# Altium footprint library for_Lamp.PcbLib: 22 footprints (part 1 of 2)
Each footprint in its own frame and in the unit in brackets; x right, y up, seen from the top. Pads: shape width x height; smd on the part's side, far side on the other; paste and mask are expansions set on the pad; w line width, h text height; cw(c..) or ccw(c..) is an arc to the next point about the centre after c.
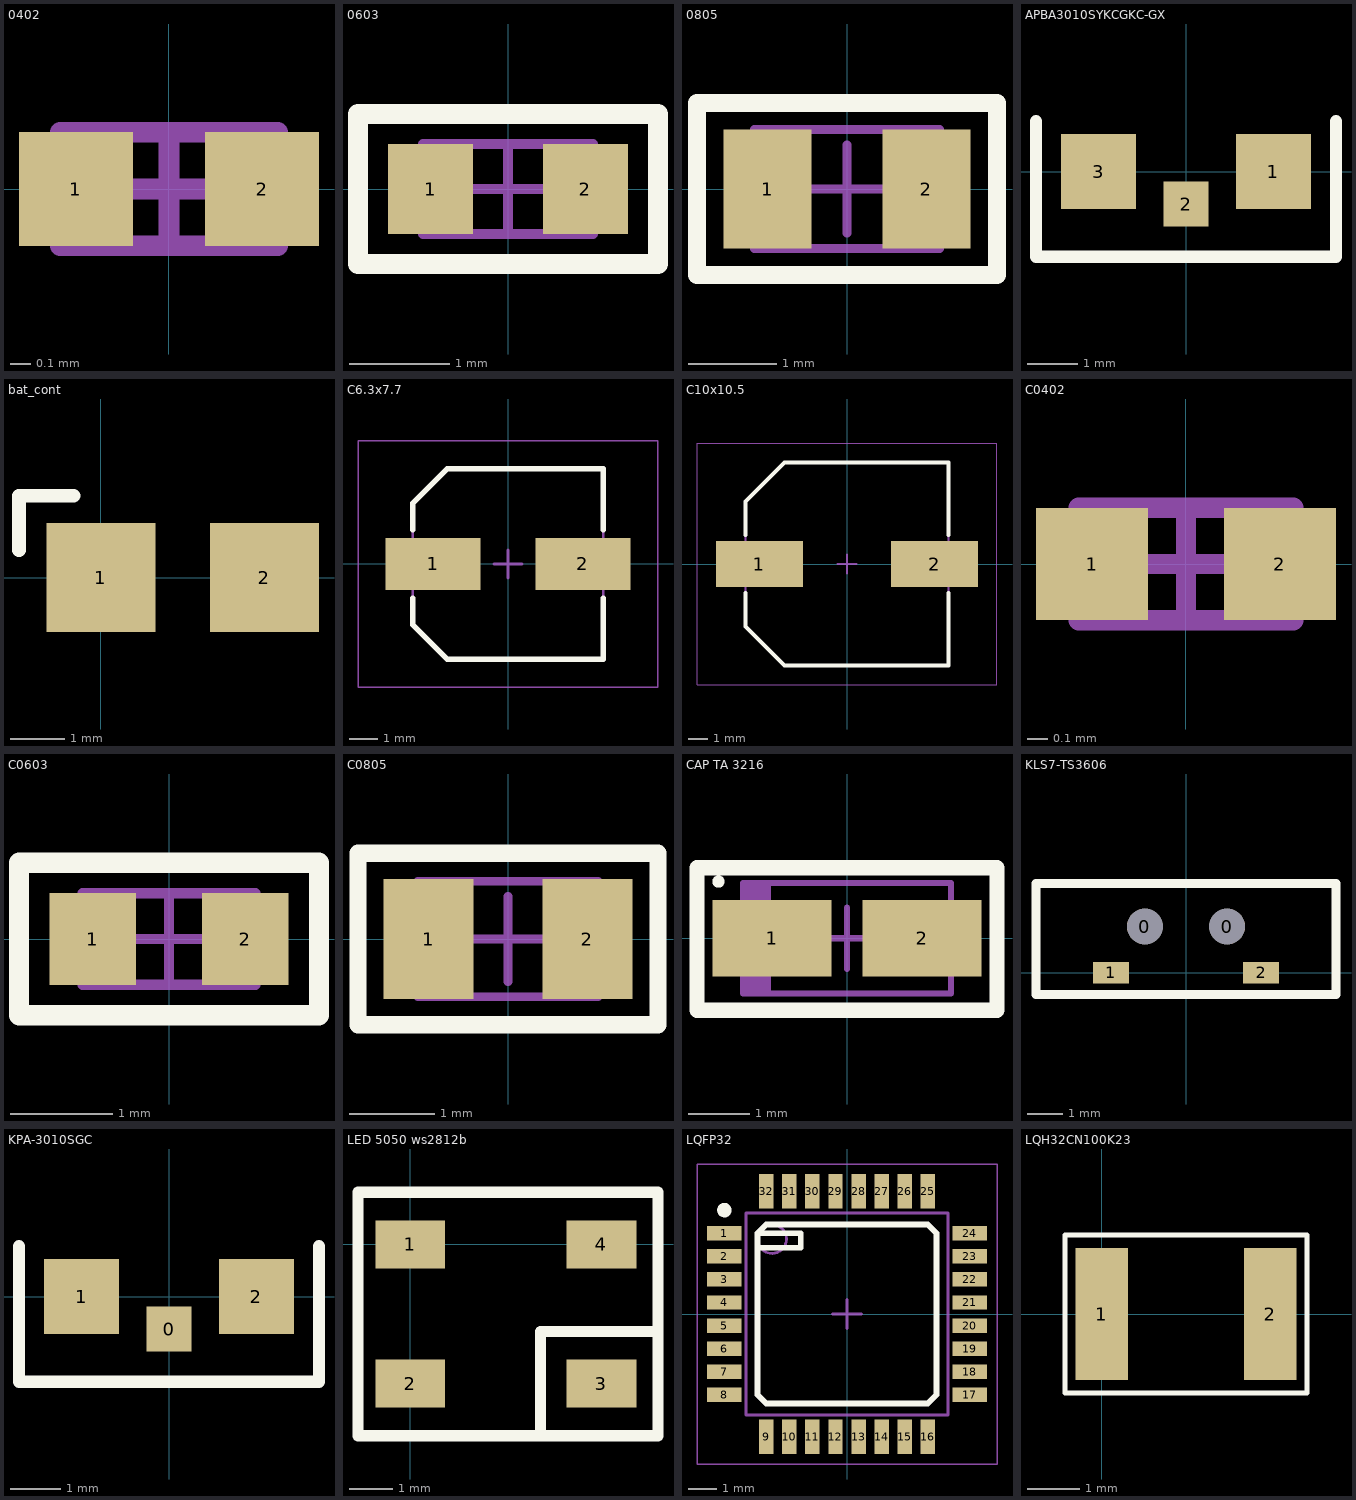
[diagram p0: the footprints below, top view; thin cyan lines are the x and y axes]

## 0402 [mm] "Chip Resistor, 2-Leads, Body 1,00x0,50mm, IPC Medium Density"
height 0.4
pads (2):
  rect 0.55x0.55 smd: 1(-0.45,0) 2(0.45,0)
Mechanical 13:
  lines w0.1: -0.525,-0.275 0.525,-0.275 0.525,0.275 -0.525,0.275 -0.525,-0.275
Mechanical 15:
  lines w0.1: -0.275,0 0.275,0 ; 0,-0.275 0,0.275
3D body "0402.step": height 0.4, standoff 0, extent -0.525,-0.275 0.525,0.275

## 0603 [mm] "Chip Resistor, 2-Leads, Body 1,60x0,80mm, IPC Medium Density"
height 0.55
pads (2):
  rect 0.85x0.9 smd: 1(-0.775,0) 2(0.775,0)
Top Overlay:
  lines w0.2: -1.5,-0.75 -1.5,0.75 1.5,0.75 1.5,-0.75 -1.5,-0.75
Mechanical 13:
  lines w0.1: -0.85,-0.45 0.85,-0.45 0.85,0.45 -0.85,0.45 -0.85,-0.45
Mechanical 15:
  lines w0.1: -0.45,0 0.45,0 ; 0,-0.45 0,0.45
3D body "R0603.step": height 0.55, standoff 0, extent -0.85,-0.45 0.85,0.45

## 0805 [mm] "Chip Resistor, 2-Leads, Body 2,00x1,25mm, IPC Medium Density"
height 0.6
pads (2):
  rect 1x1.35 smd: 1(-0.9,0) 2(0.9,0)
Top Overlay:
  lines w0.2: -1.7,-0.975 1.7,-0.975 1.7,0.975 -1.7,0.975 -1.7,-0.975
Mechanical 13:
  lines w0.1: -1.05,-0.675 1.05,-0.675 1.05,0.675 -1.05,0.675 -1.05,-0.675
Mechanical 15:
  lines w0.1: -0.5,0 0.5,0 ; 0,-0.5 0,0.5
3D body "R0805.step": height 0.6, standoff 0, extent -1.05,-0.675 1.05,0.675

## APBA3010SYKCGKC-GX [mm]
pads (3):
  rect 1.5x1.5 smd: 1(1.75,0) 3(-1.75,0)
  rect 0.9x0.9 smd: 2(0,-0.65)
Top Overlay:
  lines w0.25: -3,1 -3,-1.7 3,-1.7 3,1
3D body "APBA3010.stp": height 0.99, standoff -0.01, extent -1.491,-0.4 1.509,1.6

## bat_cont [mm]
pads (2):
  rect 2x2 smd: 1(0,0) 2(3,0)
Top Overlay:
  lines w0.25: -1.5,0.5 -1.5,1.5 -0.5,1.5

## C6.3x7.7 [mm] "Aluminum Electrolytic Capacitor, Body 6,60x6,60x7,70mm, IPC Low Density"
height 7.7
pads (2):
  rect 3.4x1.85 smd: 1(-2.675,0) 2(2.675,0)
Top Overlay:
  lines w0.2: -3.4,-1.225 -3.4,-2.163 -2.163,-3.4 3.4,-3.4 3.4,-1.225 ; -3.4,1.225 -3.4,2.163 -2.163,3.4 3.4,3.4 3.4,1.225
Mechanical 13:
  lines w0.1: -3.4,-2.163 -3.4,2.163 -2.163,3.4 3.4,3.4 3.4,-3.4 -2.163,-3.4 -3.4,-2.163
Mechanical 15:
  lines w0.05: -5.35,-4.4 5.35,-4.4 5.35,4.4 -5.35,4.4 -5.35,-4.4
  lines w0.1: -0.5,0 0.5,0 ; 0,-0.5 0,0.5
3D body "CAPAE7166X77M.step": height 7.7, standoff 0, extent -3.55,-3.4 3.55,3.4

## C10x10.5 [mm] "Aluminum Electrolytic Capacitor, Body 10,30x10,30x11,00mm, IPC Low Density"
height 11
pads (2):
  rect 4.5x2.4 smd: 1(-4.525,0) 2(4.525,0)
Top Overlay:
  lines w0.2: -5.25,-1.5 -5.25,-3.225 -3.225,-5.25 5.25,-5.25 5.25,-1.5 ; -5.25,1.5 -5.25,3.225 -3.225,5.25 5.25,5.25 5.25,1.5
Mechanical 13:
  lines w0.1: -5.25,-3.225 -5.25,3.225 -3.225,5.25 5.25,5.25 5.25,-5.25 -3.225,-5.25 -5.25,-3.225
Mechanical 15:
  lines w0.05: -7.75,-6.25 7.75,-6.25 7.75,6.25 -7.75,6.25 -7.75,-6.25
  lines w0.1: -0.5,0 0.5,0 ; 0,-0.5 0,0.5
3D body "CAPAE113103X110M.step": height 11, standoff 0, extent -5.65,-5.25 5.65,5.25

## C0402 [mm] "Chip Capacitor, 2-Leads, Body 1,00x0,50mm, IPC Medium Density"
height 0.4
pads (2):
  rect 0.55x0.55 smd: 1(-0.46,0) 2(0.46,0)
Mechanical 13:
  lines w0.1: -0.525,-0.275 -0.525,0.275 0.525,0.275 0.525,-0.275 -0.525,-0.275
Mechanical 15:
  lines w0.1: -0.275,0 0.275,0 ; 0,-0.275 0,0.275
3D body "CAPC1005X04N.step": height 0.4, standoff 0, extent -0.525,-0.275 0.525,0.275

## C0603 [mm] "Chip Capacitor, 2-Leads, Body 1,60x0,80mm, IPC Medium Density"
height 0.9
pads (2):
  rect 0.85x0.9 smd: 1(-0.75,0) 2(0.75,0)
Top Overlay:
  lines w0.2: -1.475,-0.75 -1.475,0.75 1.475,0.75 1.475,-0.75 -1.475,-0.75
Mechanical 13:
  lines w0.1: -0.85,-0.45 -0.85,0.45 0.85,0.45 0.85,-0.45 -0.85,-0.45
Mechanical 15:
  lines w0.1: -0.45,0 0.45,0 ; 0,-0.45 0,0.45
3D body "CAPC1608X09N.step": height 0.9, standoff 0, extent -0.85,-0.45 0.85,0.45

## C0805 [mm] "Chip Capacitor, 2-Leads, Body 2,00x1,25mm, IPC Medium Density"
height 1.35
pads (2):
  rect 1.05x1.4 smd: 1(-0.925,0) 2(0.925,0)
Top Overlay:
  lines w0.2: -1.75,-1 1.75,-1 1.75,1 -1.75,1 -1.75,-1
Mechanical 13:
  lines w0.1: -1.05,-0.675 -1.05,0.675 1.05,0.675 1.05,-0.675 -1.05,-0.675
Mechanical 15:
  lines w0.1: -0.5,0 0.5,0 ; 0,-0.5 0,0.5
3D body "C0805.step": height 1.35, standoff 0, extent -1.05,-0.675 1.05,0.675

## CAP TA 3216 [mm] "Molded Capacitor, 2-Leads, Body 3,20x1,60mm, IPC Medium Density"
height 1.8
pads (2):
  rect 1.95x1.25 smd: 1(-1.225,0) 2(1.225,0)
Top Overlay:
  circle w0.1: c-2.1,0.925 r0.05
  lines w0.25: -2.45,-1.175 -2.45,1.15 2.45,1.15 2.45,-1.175 -2.45,-1.175
Mechanical 13:
  rectangle: -1.7,-0.9 -1.243,0.9
  lines w0.1: -1.7,-0.9 1.7,-0.9 1.7,0.9 -1.7,0.9 -1.7,-0.9
Mechanical 15:
  lines w0.05: -2.45,-1.15 2.45,-1.15 2.45,1.15 -2.45,1.15 -2.45,-1.15
  lines w0.1: -0.5,0 0.5,0 ; 0,-0.5 0,0.5
3D body "Tant Cap SMD size A _ 3216-18.stp": height 1.64, standoff 0.01, extent -1.73,-0.8 1.73,0.8

## KLS7-TS3606 [mm]
pads (4):
  round 1 hole 1 unplated: 0(-1.15,1.3) 0(1.15,1.3)
  rect 1x0.6 smd: 1(-2.1,0) 2(2.1,0)
Top Overlay:
  lines w0.25: -4.2,-0.6 -4.2,2.5 4.2,2.5 4.2,-0.6 -4.2,-0.6
3D body "IT-1188E.STEP": height 3.5, standoff -0.7, extent -3.902,-0.05 3.898,3.55

## KPA-3010SGC [mm] "3.0 x 1.0 mm Right Angle SMD Chip LED Lamp"
pads (3):
  rect 0.9x0.9 smd: 0(0,-0.65)
  rect 1.5x1.5 smd: 1(-1.75,0) 2(1.75,0)
Top Overlay:
  lines w0.25: -3,1 -3,-1.7 3,-1.7 3,1
3D body "APBA3010.stp": height 0.99, standoff -0.01, extent -1.5,-0.4 1.5,1.6

## LED 5050 ws2812b [mm]
pads (4):
  rect 1.6x1.1 smd: 1(0,0) 2(0,-3.2) 3(4.4,-3.2) 4(4.4,0)
Top Overlay:
  lines w0.25: 3,-4.4 3,-2 5.7,-2
  lines w0.254: -1.2,-4.4 5.7,-4.4 5.7,1.2 -1.2,1.2 -1.2,-4.4
3D body "WS2812_RGB_LED_updated.stp": height 1.7, standoff 0, extent -0.475,-4.075 4.875,0.875

## LQFP32 [mm] "CQFP, 32-Leads, Body 9,00x9,00mm, Pitch 0,80mm, IPC Medium Density"
height 1.6
pads (32):
  rect 1.2x0.5 smd: 1(-4.25,2.8) 2(-4.25,2) 3(-4.25,1.2) 4(-4.25,0.4) 5(-4.25,-0.4) 6(-4.25,-1.2) 7(-4.25,-2) 8(-4.25,-2.8) 17(4.25,-2.8) 18(4.25,-2) 19(4.25,-1.2) 20(4.25,-0.4) 21(4.25,0.4) 22(4.25,1.2) 23(4.25,2) 24(4.25,2.8)
  rect 0.5x1.2 smd: 9(-2.8,-4.25) 10(-2,-4.25) 11(-1.2,-4.25) 12(-0.4,-4.25) 13(0.4,-4.25) 14(1.2,-4.25) 15(2,-4.25) 16(2.8,-4.25) 25(2.8,4.25) 26(2,4.25) 27(1.2,4.25) 28(0.4,4.25) 29(-0.4,4.25) 30(-1.2,4.25) 31(-2,4.25) 32(-2.8,4.25)
Top Overlay:
  circle w0.25: c-4.25,3.6 r0.125
  lines w0.2: -3.1,2.3 -1.6,2.3 -1.6,2.8 -3.1,2.8 ; -3.1,2.8 -2.8,3.1 2.8,3.1 3.1,2.8 3.1,-2.8 2.8,-3.1 -2.8,-3.1 -3.1,-2.8 -3.1,2.8
Mechanical 13:
  circle w0.1: c-2.6,2.6 r0.5
  lines w0.1: -3.5,-3.5 3.5,-3.5 3.5,3.5 -3.5,3.5 -3.5,-3.5
Mechanical 15:
  lines w0.05: -5.2,-5.2 5.2,-5.2 5.2,5.2 -5.2,5.2 -5.2,-5.2
  lines w0.1: -0.5,0 0.5,0 ; 0,-0.5 0,0.5
3D body "CQFP80P900X900X160-32N.step": height 1.45, standoff 0, extent -4.6,-4.6 4.6,4.6

## LQH32CN100K23 [mm]
pads (2):
  rect 1x2.5 smd paste-2539.97 mask+0.1: 1(0,0) 2(3.2,0)
Top Overlay:
  lines w0.1: -0.7,-1.5 3.9,-1.5 3.9,1.5 -0.7,1.5 -0.7,-1.5
3D body "LQH32CN4R7M23L.STEP": height 2, standoff 0, extent 0,-1.25 3.2,1.25